# Altium footprint library StandardCase.PcbLib: 209 footprints (part 3 of 14)
Each footprint in its own frame and in the unit in brackets; x right, y up, seen from the top. Pads: shape width x height; smd on the part's side, far side on the other; paste and mask are expansions set on the pad; w line width, h text height; cw(c..) or ccw(c..) is an arc to the next point about the centre after c.
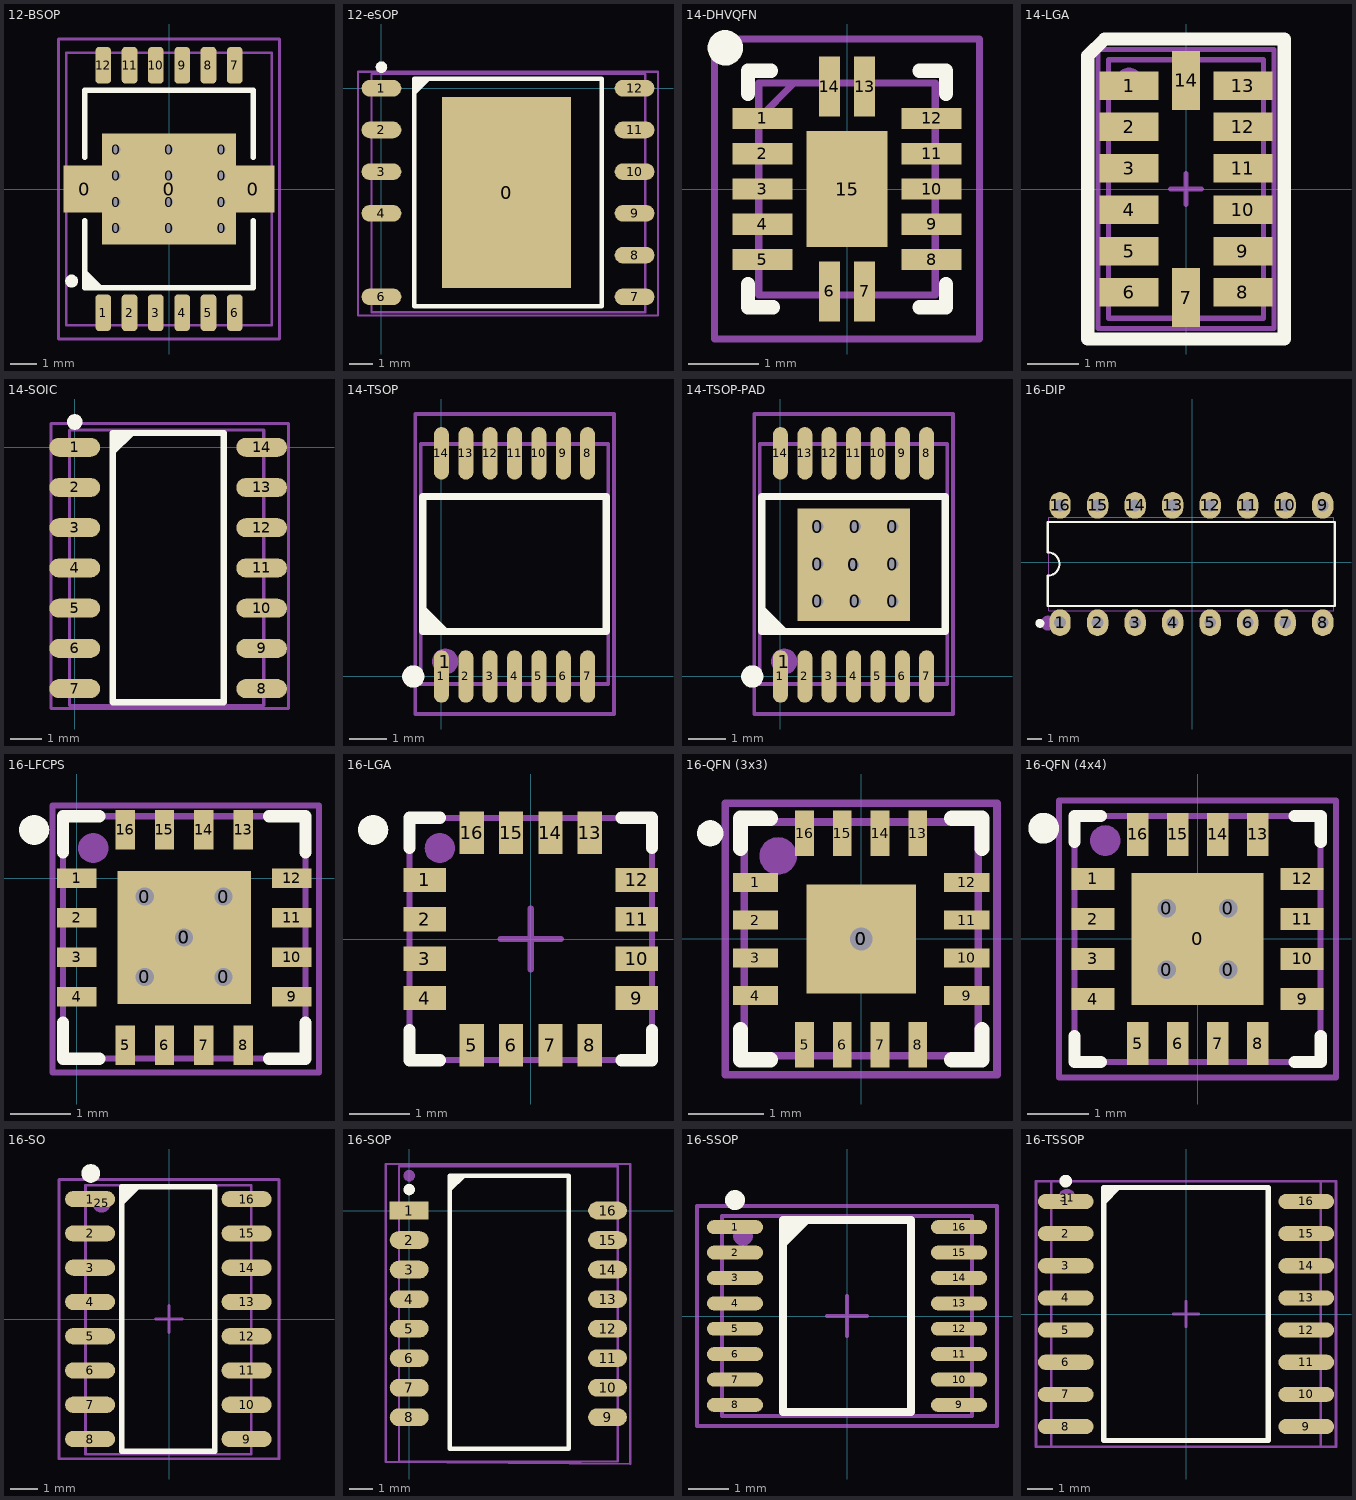
[diagram p2: the footprints below, top view; thin cyan lines are the x and y axes]

## 12-BSOP [mm]
pads (28):
  rect 1.6x1.8 smd: 0(-3.2,0) 0(3.2,0)
  round 0.7 hole 0.3: 0(-2,-1.5) 0(-2,-0.5) 0(-2,0.5) 0(-2,1.5) 0(0,-1.5) 0(0,-0.5) 0(0,0.5) 0(0,1.5) 0(2,-1.5) 0(2,-0.5) 0(2,0.5) 0(2,1.5)
  rect 5.1x4.2 smd: 0(0,0)
  rrect50% 0.6x1.4 smd: 1(-2.5,-4.7) 2(-1.5,-4.7) 3(-0.5,-4.7) 4(0.5,-4.7) 5(1.5,-4.7) 6(2.5,-4.7) 7(2.5,4.7) 8(1.5,4.7) 9(0.5,4.7) 10(-0.5,4.7) 11(-1.5,4.7) 12(-2.5,4.7)
  round 0.5 on Top Overlay: ""(-3.7,-3.5)
Top Overlay:
  region: -3.2,-3.75 -2.48,-3.75 -3.2,-3.03
  lines w0.2: -3.2,-1.2 -3.2,-3.75 3.2,-3.75 3.2,-1.2 ; -3.2,1.2 -3.2,3.75 3.2,3.75 3.2,1.2
Mechanical 1:
  lines w0.1: -3.9,-5.171 -3.9,5.172 3.9,5.172 3.9,-5.171 -3.9,-5.171
Mechanical 15:
  lines w0.1: -0.5,0 0.5,0 ; 0,-0.5 0,0.5 ; -4.2,-5.7 4.2,-5.7 4.2,5.7 -4.2,5.7 -4.2,-5.7
3D body "12-BSOP.SLDPRT": height 2.53, standoff -0.02, extent -3.9,-5.171 3.9,5.172

## 12-eSOP [mm]
pads (14):
  rect 5.5x8.15 smd: 0(5.34,-4.45)
  oval 1.7x0.71 smd: 1(0,0) 2(0,-1.78) 3(0,-3.56) 4(0,-5.34) 6(0,-8.9) 7(10.8,-8.9) 8(10.8,-7.12) 9(10.8,-5.34) 10(10.8,-3.56) 11(10.8,-1.78) 12(10.8,0)
  round 0.5 on Top Overlay: ""(0,0.9)
  round 0.5 on Mech1: ""(0.1,0.1)
Top Overlay:
  region: 1.4,0.4 1.4,-0.32 2.12,0.4
  lines w0.2: 1.4,-9.3 1.4,0.4 9.4,0.4 9.4,-9.3 1.4,-9.3
Mechanical 1:
  lines w0.1: -0.425,-9.555 11.255,-9.555 11.255,0.605 -0.425,0.605 -0.425,-9.555
Mechanical 15:
  lines w0.1: -1,-9.7 11.8,-9.7 11.8,0.7 -1,0.7 -1,-9.7
3D body "User Library-eSOP-12B.STEP": height 2.49, standoff 0.01, extent -0.425,-9.555 11.255,0.605

## 14-DHVQFN [mm]
pads (15):
  rect 0.85x0.3 smd: 1(-1.2,1) 2(-1.2,0.5) 3(-1.2,0) 4(-1.2,-0.5) 5(-1.2,-1) 8(1.2,-1) 9(1.2,-0.5) 10(1.2,0) 11(1.2,0.5) 12(1.2,1)
  rect 0.3x0.85 smd: 6(-0.25,-1.45) 7(0.25,-1.45) 13(0.25,1.45) 14(-0.25,1.45)
  rect 1.15x1.65 smd: 15(0,0)
Top Overlay:
  circle w0.25: c-1.725,2 r0.125
  lines w0.2: -1.4,-1.675 -1.4,-1.35 ; -1.4,1.35 -1.4,1.675 -1.075,1.675 ; -1.375,-1.675 -1.05,-1.675 ; 1.025,-1.675 1.35,-1.675 ; 1.025,1.675 1.35,1.675 ; 1.4,-1.675 1.4,-1.35 ; 1.4,1.35 1.4,1.675
Mechanical 13:
  lines w0.1: -1.25,1 -0.75,1.5 ; -1.25,-1.5 1.25,-1.5 1.25,1.5 -1.25,1.5 -1.25,-1.5
Mechanical 15:
  lines w0.1: -1.875,-2.125 1.875,-2.125 1.875,2.125 -1.875,2.125 -1.875,-2.125
3D body "74LVC125ABQ,115.stp": height 1, standoff 0, extent -1.3,-1.55 1.3,1.55

## 14-LGA [mm]
height 1
pads (15):
  rect 1.145x0.55 smd: 1(-1.1,2) 2(-1.1,1.2) 3(-1.1,0.4) 4(-1.1,-0.4) 5(-1.1,-1.2) 6(-1.1,-2) 8(1.1,-2) 9(1.1,-1.2) 10(1.1,-0.4) 11(1.1,0.4) 12(1.1,1.2) 13(1.1,2)
  rect 0.55x1.145 smd: 7(0,-2.1) 14(0,2.1)
  round 0.5 on Mech1: ""(-1.1,2.1)
Top Overlay:
  lines w0.254: -1.9,-2.9 1.9,-2.9 1.9,2.9 -1.575,2.9 -1.9,2.575 -1.9,-2.9
Mechanical 1:
  lines w0.1: -1.5,-2.5 1.5,-2.5 1.5,2.5 -1.5,2.5 -1.5,-2.5
Mechanical 15:
  lines w0.1: -0.3,0 0.3,0 ; 0,-0.3 0,0.3 ; -1.7,-2.7 -1.7,2.7 1.7,2.7 1.7,-2.7 -1.7,-2.7
3D body "SW3dPS-LGA-14.STEP": height 1.03, standoff -0.4, extent -1.49,-2.5 1.51,2.5

## 14-SOIC [mm] "pitch 1.27 mm"
pads (16):
  rrect100% 1.6x0.6 smd: 1(0,0) 2(0,-1.27) 3(0,-2.54) 4(0,-3.81) 5(0,-5.08) 6(0,-6.35) 7(0,-7.62) 8(5.9,-7.62) 9(5.9,-6.35) 10(5.9,-5.08) 11(5.9,-3.81) 12(5.9,-2.54) 13(5.9,-1.27) 14(5.9,0)
  rrect100% 0.5x0.5 on Top Overlay: ""(0,0.8)
  round 0.5 on Mech1: ""(0.5,0)
Top Overlay:
  region: 1.2,0.45 1.2,-0.27 1.92,0.45
  lines w0.2: 1.2,-8.05 1.2,0.45 4.7,0.45 4.7,-8.05 1.2,-8.05
Mechanical 1:
  lines w0.1: -0.168,-8.15 5.969,-8.15 5.969,0.55 -0.168,0.55 -0.168,-8.15
Mechanical 15:
  lines w0.1: -0.75,-8.25 6.75,-8.25 6.75,0.5 6.75,0.75 -0.75,0.75 -0.75,-8.25
3D body "User Library-so14-2.STEP": height 1.78, standoff 0.01, extent -0.118,-8.15 6.019,0.55

## 14-TSOP [mm]
pads (16):
  rrect100% 0.4x1.4 smd: 1(0,0) 2(0.65,0) 3(1.3,0) 4(1.95,0) 5(2.6,0) 6(3.25,0) 7(3.9,0) 8(3.9,5.95) 9(3.25,5.95) 10(2.6,5.95) 11(1.95,5.95) 12(1.3,5.95) 13(0.65,5.95) 14(0,5.95)
  round 0.7 on Mech1: 1(0.1,0.4)
  round 0.6 on Top Overlay: ""(-0.75,0)
Top Overlay:
  region: -0.5,1.2 0.22,1.2 -0.5,1.92
  lines w0.2: -0.5,1.2 4.4,1.2 4.4,4.8 -0.5,4.8 -0.5,1.2
Mechanical 1:
  lines w0.1: -0.55,6.2 -0.55,6.2 ; -0.55,6.2 4.45,6.2 4.45,-0.2 -0.55,-0.2 -0.55,6.2
Mechanical 15:
  lines w0.1: -0.7,-1 -0.7,7 4.6,7 4.6,2.4 4.6,-1 -0.7,-1
3D body "SW3dPS-TSSOP14-1.STEP": height 1.1, standoff 0, extent -0.55,-0.2 4.45,6.2

## 14-TSOP-PAD [mm] "pitch 0.65 mm, power pad"
pads (26):
  round 0.7 hole 0.3: 0(1,2) 0(1,3) 0(1,4) 0(1.95,2.975) 0(2,2) 0(2,4) 0(3,2) 0(3,3) 0(3,4)
  rect 3x3 smd: 0(1.95,2.975)
  rrect100% 0.4x1.4 smd: 1(0,0) 2(0.65,0) 3(1.3,0) 4(1.95,0) 5(2.6,0) 6(3.25,0) 7(3.9,0) 8(3.9,5.95) 9(3.25,5.95) 10(2.6,5.95) 11(1.95,5.95) 12(1.3,5.95) 13(0.65,5.95) 14(0,5.95)
  round 0.7 on Mech1: 1(0.1,0.4)
  round 0.6 on Top Overlay: ""(-0.75,0)
Top Overlay:
  region: -0.5,1.2 0.22,1.2 -0.5,1.92
  lines w0.2: -0.5,1.2 4.4,1.2 4.4,4.8 -0.5,4.8 -0.5,1.2
Mechanical 1:
  lines w0.1: -0.55,6.2 -0.55,6.2 ; -0.55,6.2 4.45,6.2 4.45,-0.2 -0.55,-0.2 -0.55,6.2
Mechanical 15:
  lines w0.1: -0.7,-1 -0.7,7 4.6,7 4.6,2.4 4.6,-1 -0.7,-1
3D body "SW3dPS-TSSOP14-1.STEP": height 1.1, standoff 0, extent -0.55,-0.2 4.45,6.2

## 16-DIP [mm]
pads (16):
  oval 1.44x1.8 hole 0.8: 1(-8.94,-4.101) 2(-6.4,-4.101) 3(-3.86,-4.101) 4(-1.32,-4.101) 5(1.22,-4.101) 6(3.76,-4.101) 7(6.3,-4.101) 8(8.84,-4.101) 9(8.84,3.839) 10(6.3,3.839) 11(3.76,3.839) 12(1.22,3.839) 13(-1.32,3.839) 14(-3.86,3.839) 15(-6.4,3.839) 16(-8.94,3.839)
Top Overlay:
  circle w0.3: c-10.31,-4.151 r0.15
  lines w0.152: -9.778,-2.972 9.679,-2.972 9.679,2.71 -9.778,2.71 -9.778,0.663 cw(c-9.778,-0.131) -9.778,-0.925 -9.778,-2.972
Bottom Assembly:
  circle w0.5: c-9.759,-4.131 r0.25
Mechanical 15:
  region: -9.17,-4.101 -9.17,-3.851 -8.71,-3.851 -8.71,-4.101
  region: -9.17,3.589 -9.17,3.839 -8.71,3.839 -8.71,3.589
  region: -6.63,-4.101 -6.63,-3.851 -6.17,-3.851 -6.17,-4.101
  region: -6.63,3.589 -6.63,3.839 -6.17,3.839 -6.17,3.589
  region: -4.09,-4.101 -4.09,-3.851 -3.63,-3.851 -3.63,-4.101
  region: -4.09,3.589 -4.09,3.839 -3.63,3.839 -3.63,3.589
  region: -1.55,-4.101 -1.55,-3.851 -1.09,-3.851 -1.09,-4.101
  region: -1.55,3.589 -1.55,3.839 -1.09,3.839 -1.09,3.589
  region: 0.99,-4.101 0.99,-3.851 1.45,-3.851 1.45,-4.101
  region: 0.99,3.589 0.99,3.839 1.45,3.839 1.45,3.589
  region: 3.53,-4.101 3.53,-3.851 3.99,-3.851 3.99,-4.101
  region: 3.53,3.589 3.53,3.839 3.99,3.839 3.99,3.589
  region: 6.07,-4.101 6.07,-3.851 6.53,-3.851 6.53,-4.101
  region: 6.07,3.589 6.07,3.839 6.53,3.839 6.53,3.589
  region: 8.61,-4.101 8.61,-3.851 9.07,-3.851 9.07,-4.101
  region: 8.61,3.589 8.61,3.839 9.07,3.839 9.07,3.589
  region: -9.642,-4.361 -9.642,-4.386 -9.677,-4.421 -9.727,-4.421 -9.762,-4.386 -9.762,-4.361 -9.762,-4.336 -9.727,-4.301 -9.677,-4.301 -9.642,-4.336
  lines w0.051: -9.702,-3.306 9.603,-3.306 9.603,3.044 -9.702,3.044 -9.702,-3.306
3D body "dip-16.step": height 2.9, standoff -2.5, extent -10.325,-4.085 10.175,3.835

## 16-LFCPS [mm] "4x4 mm, pitch 0.65 mm"
height 0.9
pads (24):
  round 0.7 hole 0.3: 0(1.125,-1.625) 0(1.125,-0.3) 0(1.775,-0.975) 0(2.425,-1.625) 0(2.425,-0.3)
  rect 2.2x2.2 smd: 0(1.775,-0.975)
  rect 0.65x0.32 smd: 1(0,0) 2(0,-0.65) 3(0,-1.3) 4(0,-1.95) 9(3.55,-1.95) 10(3.55,-1.3) 11(3.55,-0.65) 12(3.55,0)
  rect 0.32x0.65 smd: 5(0.8,-2.75) 6(1.45,-2.75) 7(2.1,-2.75) 8(2.75,-2.75) 13(2.75,0.8) 14(2.1,0.8) 15(1.45,0.8) 16(0.8,0.8)
  round 0.5 on Top Overlay: ""(-0.7,0.8)
  round 0.5 on Mech1: ""(0.275,0.5)
Top Overlay:
  lines w0.2: -0.225,-2.375 -0.225,-2.975 0.375,-2.975 ; -0.225,0.425 -0.225,1.025 0.375,1.025 ; 3.175,-2.975 3.775,-2.975 3.775,-2.375 ; 3.175,1.025 3.775,1.025 3.775,0.425
Mechanical 1:
  lines w0.1: -0.225,-2.975 -0.225,1.025 3.775,1.025 3.775,-2.975 -0.225,-2.975
Mechanical 15:
  lines w0.1: -0.4,-3.2 4,-3.2 4,1.2 -0.4,1.2 -0.4,-3.2
3D body "User Library-qfn16-4x4No pad.STEP": height 0.92, standoff 0, extent -0.225,-2.975 3.775,1.025

## 16-LGA [mm] "4x4 mm, pitch 0.65 mm"
height 1
pads (18):
  rect 0.7x0.4 smd: 1(-1.75,0.975) 2(-1.75,0.325) 3(-1.75,-0.325) 4(-1.75,-0.975) 9(1.75,-0.975) 10(1.75,-0.325) 11(1.75,0.325) 12(1.75,0.975)
  rect 0.4x0.7 smd: 5(-0.975,-1.75) 6(-0.325,-1.75) 7(0.325,-1.75) 8(0.975,-1.75) 13(0.975,1.75) 14(0.325,1.75) 15(-0.325,1.75) 16(-0.975,1.75)
  round 0.5 on Top Overlay: ""(-2.6,1.8)
  round 0.5 on Mech1: ""(-1.5,1.5)
Top Overlay:
  lines w0.2: -2,-1.5 -2,-2 -1.5,-2 ; -2,1.5 -2,2 -1.5,2 ; 1.5,-2 2,-2 2,-1.5 ; 1.5,2 2,2 2,1.5
Mechanical 1:
  lines w0.1: -2,-2 -2,2 2,2 2,-2 -2,-2
Mechanical 15:
  lines w0.1: -0.5,0 0.5,0 ; 0,-0.5 0,0.5 ; -2,-2 -2,2 2,2 2,-2 -2,-2
3D body "User Library-LGA-16.step": height 0.98, standoff 0, extent -2,-2 2,2

## 16-QFN (3x3) [mm] "3x3 mm, pitch 0.5 mm"
height 0.75
pads (20):
  rect 1.45x1.45 smd: 0(0,0)
  round 0.7 hole 0.3: 0(0,0)
  rect 0.6x0.25 smd: 1(-1.4,0.75) 2(-1.4,0.25) 3(-1.4,-0.25) 4(-1.4,-0.75) 9(1.4,-0.75) 10(1.4,-0.25) 11(1.4,0.25) 12(1.4,0.75)
  rect 0.25x0.6 smd: 5(-0.75,-1.4) 6(-0.25,-1.4) 7(0.25,-1.4) 8(0.75,-1.4) 13(0.75,1.4) 14(0.25,1.4) 15(-0.25,1.4) 16(-0.75,1.4)
  round 0.35 on Top Overlay: ""(-2,1.4)
  round 0.5 on Mech1: ""(-1.1,1.1)
Top Overlay:
  lines w0.2: -1.6,-1.2 -1.6,-1.6 -1.2,-1.6 ; -1.6,1.2 -1.6,1.6 -1.2,1.6 ; 1.2,-1.6 1.6,-1.6 1.6,-1.2 ; 1.2,1.6 1.6,1.6 1.6,1.2
Mechanical 1:
  lines w0.1: -1.55,-1.55 -1.55,1.55 1.55,1.55 1.55,-1.55 -1.55,-1.55
Mechanical 15:
  lines w0.1: -0.2,0 0.2,0 ; 0,-0.2 0,0.2 ; -1.8,-1.8 1.8,-1.8 1.8,1.8 -1.8,1.8 -1.8,-1.8
3D body "User Library-QFN-16.STEP": height 0.9, standoff 0, extent -1.501,-1.501 1.501,1.501

## 16-QFN (4x4) [mm] "4x4 mm, pitch 0.65 mm"
height 0.75
pads (22):
  round 0.7 hole 0.3: 0(-0.5,-0.5) 0(-0.5,0.5) 0(0.5,-0.5) 0(0.5,0.5)
  rect 2.15x2.15 smd: 0(0,0)
  rect 0.7x0.35 smd: 1(-1.7,0.975) 2(-1.7,0.325) 3(-1.7,-0.325) 4(-1.7,-0.975) 9(1.7,-0.975) 10(1.7,-0.325) 11(1.7,0.325) 12(1.7,0.975)
  rect 0.35x0.7 smd: 5(-0.975,-1.7) 6(-0.325,-1.7) 7(0.325,-1.7) 8(0.975,-1.7) 13(0.975,1.7) 14(0.325,1.7) 15(-0.325,1.7) 16(-0.975,1.7)
  round 0.5 on Mech1: ""(-1.5,1.6)
Top Overlay:
  circle w0.25: c-2.5,1.8 r0.125
  lines w0.2: -2,-1.575 -2,-2 -1.575,-2 ; -2,1.575 -2,2 -1.575,2 ; 1.575,-2 2,-2 2,-1.575 ; 1.575,2 2,2 2,1.575
Mechanical 1:
  lines w0.1: -2,-2 -2,2 2,2 2,-2 -2,-2
Mechanical 15:
  lines w0.1: -0.5,0 0.5,0 ; 0,-0.5 0,0.5 ; -2.25,-2.25 -2.25,2.25 2.25,2.25 2.25,-2.25 -2.25,-2.25
3D body "16-QFN (4x4).step": height 0.75, standoff 0, extent -2,-2 2,2

## 16-SO [mm] "pitch 1.27 mm"
height 2.65
pads (18):
  oval 1.85x0.6 smd: 1(-2.925,4.448) 2(-2.925,3.178) 3(-2.925,1.908) 4(-2.925,0.638) 5(-2.925,-0.632) 6(-2.925,-1.902) 7(-2.925,-3.172) 8(-2.925,-4.442) 9(2.875,-4.442) 10(2.875,-3.172) 11(2.875,-1.902) 12(2.875,-0.632) 13(2.875,0.638) 14(2.875,1.908) 15(2.875,3.178) 16(2.875,4.448)
  round 0.7 on Mech1: 25(-2.5,4.3)
  round 0.7 on Top Overlay: ""(-2.9,5.4)
Top Overlay:
  region: -1.75,4.9 -1.75,4.18 -1.03,4.9
  lines w0.2: -1.75,-4.9 -1.75,4.9 1.7,4.9 1.7,-4.9 -1.75,-4.9
Mechanical 1:
  lines w0.1: -3.093,-5.01 -3.093,4.96 3.044,4.96 3.044,-5.01 -3.093,-5.01
Mechanical 15:
  lines w0.1: -0.499,0.003 0.501,0.003 ; 0.001,-0.497 0.001,0.503 ; -4.075,-5.175 -4.075,5.175 4.075,5.175 4.075,-5.175 -4.075,-5.175
3D body "User Library-so16-1.STEP": height 1.73, standoff -0.04, extent -3.093,-5.01 3.044,4.96

## 16-SOP [mm] "pitch 1.27 mm"
pads (18):
  rect 1.67x0.76 smd: 1(0,0)
  oval 1.67x0.76 smd: 2(0,-1.27) 3(0,-2.54) 4(0,-3.81) 5(0,-5.08) 6(0,-6.35) 7(0,-7.62) 8(0,-8.89) 9(8.53,-8.89) 10(8.53,-7.62) 11(8.53,-6.35) 12(8.53,-5.08) 13(8.53,-3.81) 14(8.53,-2.54) 15(8.53,-1.27) 16(8.53,0)
  round 0.5 on Top Overlay: ""(0,0.9)
  round 0.5 on Mech1: ""(0,1.5)
Top Overlay:
  region: 1.75,1.5 1.75,0.78 2.47,1.5
  lines w0.2: 4.583,1.5 6.86,1.5 6.86,-10.25 1.75,-10.25 1.75,1.5 6,1.5
Mechanical 1:
  lines w0.1: -0.435,-10.795 8.965,-10.795 8.965,1.905 -0.435,1.905 -0.435,-10.795
Mechanical 15:
  lines w0.1: -1,-10.8 9.5,-10.9 9.5,2 -1,2 -1,-10.8
3D body "User Library-smt4.step": height 5.1, standoff 0, extent -0.435,-10.795 8.965,1.905

## 16-SSOP [mm] "pitch 0.635 mm"
height 1.75
pads (17):
  oval 1.4x0.35 smd: 1(-2.8,2.222) 2(-2.8,1.587) 3(-2.8,0.953) 4(-2.8,0.318) 5(-2.8,-0.318) 6(-2.8,-0.953) 7(-2.8,-1.587) 8(-2.8,-2.222) 9(2.8,-2.222) 10(2.8,-1.587) 11(2.8,-0.953) 12(2.8,-0.318) 13(2.8,0.318) 14(2.8,0.953) 15(2.8,1.587) 16(2.8,2.222)
  round 0.5 on Mech1: ""(-2.6,2)
Top Overlay:
  circle w0.25: c-2.8,2.9 r0.125
  region: -1.6,2.4 -1.6,1.68 -0.88,2.4
  lines w0.2: -1.6,-2.4 -1.6,2.4 1.6,2.4 1.6,-2.4 -1.6,-2.4
Mechanical 1:
  lines w0.1: -3.127,-2.5 -3.127,2.5 3.126,2.5 3.126,-2.5 -3.127,-2.5
Mechanical 15:
  lines w0.1: -0.5,0 0.5,0 ; 0,-0.5 0,0.5 ; -3.75,-2.75 -3.75,2.75 3.75,2.75 3.75,-2.75 -3.75,-2.75
3D body "ssop16.step": height 1.73, standoff -0.01, extent -3.127,-2.5 3.126,2.5

## 16-TSSOP [mm] "pitch 1.27 mm"
height 2.65
pads (17):
  oval 2.2x0.6 smd: 1(-4.75,4.445) 2(-4.75,3.175) 3(-4.75,1.905) 4(-4.75,0.635) 5(-4.75,-0.635) 6(-4.75,-1.905) 7(-4.75,-3.175) 8(-4.75,-4.445) 9(4.75,-4.445) 10(4.75,-3.175) 11(4.75,-1.905) 12(4.75,-0.635) 13(4.75,0.635) 14(4.75,1.905) 15(4.75,3.175) 16(4.75,4.445)
  round 0.7 on Mech1: 31(-4.7,4.6)
Top Overlay:
  circle w0.25: c-4.75,5.25 r0.125
  region: -3.25,5 -3.25,4.28 -2.53,5
  lines w0.2: -3.25,-5 -3.25,5 3.25,5 3.25,-5 -3.25,-5
Mechanical 1:
  lines w0.1: -5.315,-5.25 5.315,-5.25 5.315,5.25 -5.315,5.25 -5.315,-5.25
Mechanical 15:
  lines w0.1: -0.5,0 0.5,0 ; 0,-0.5 0,0.5 ; -5.925,-5.25 5.925,-5.25 5.925,5.25 -5.925,5.25 -5.925,-5.25
3D body "User Library-SOIC16_Wide_JEDEC_MS-013AA.STEP": height 2.62, standoff -0.03, extent -5.315,-5.25 5.315,5.25